# Altium schematic symbol library PCB4_SchLib.SchLib: 20 symbols
Pins are listed as number, name and electrical type; pins without a type are passive.

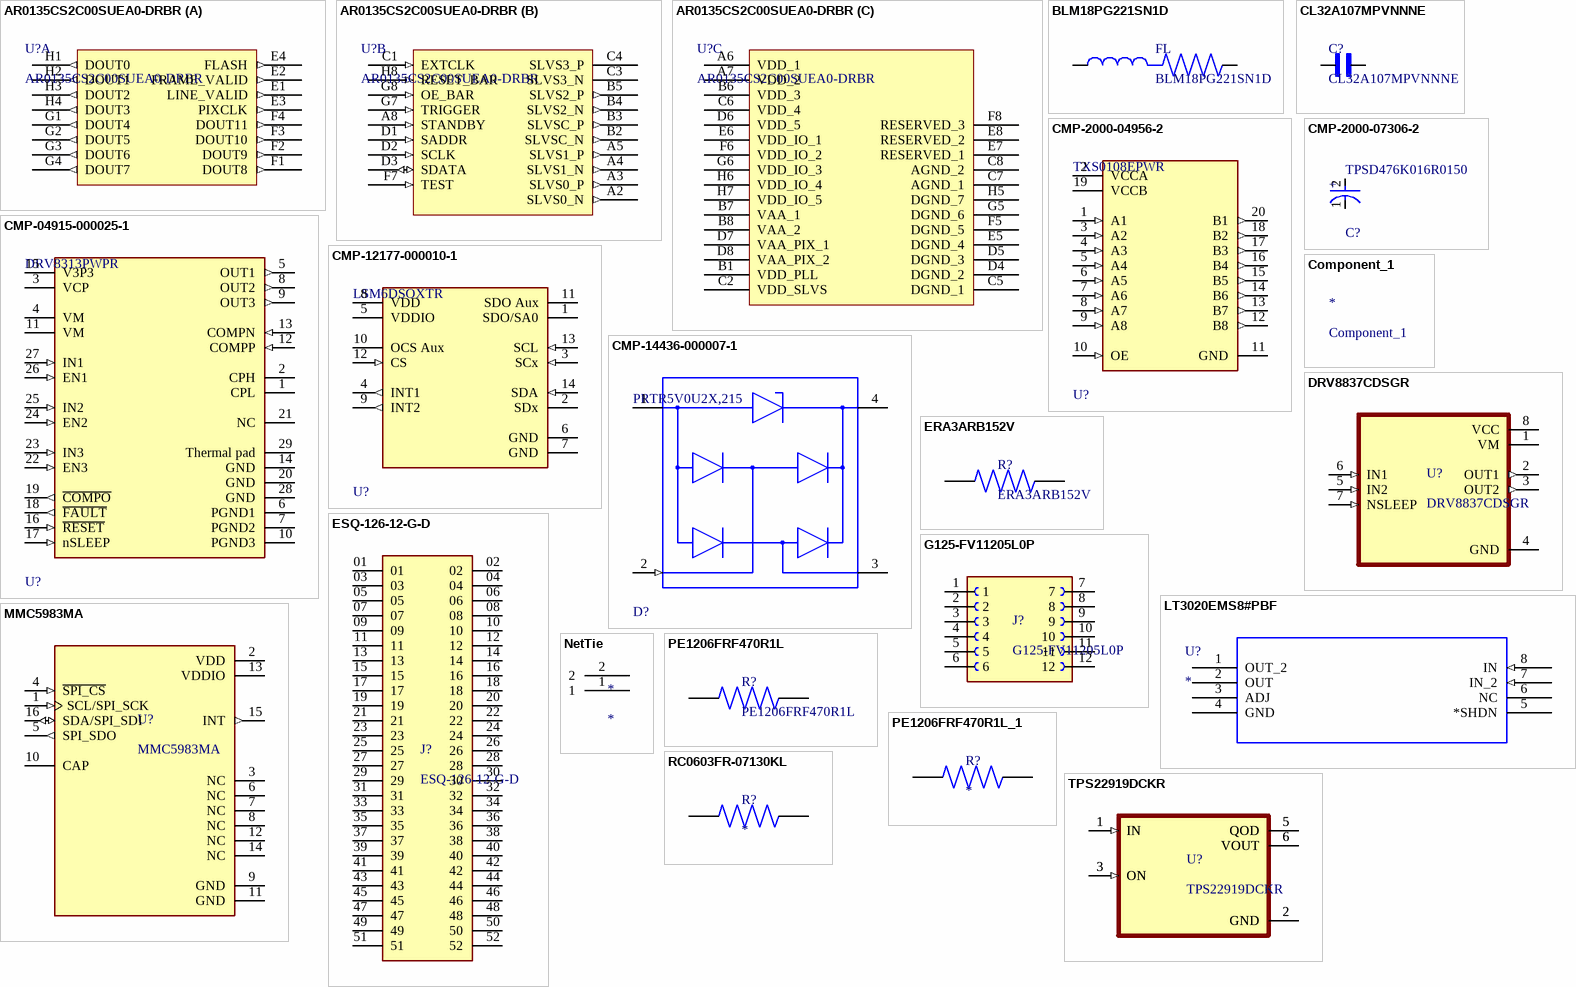
[diagram p0: symbols AR0135CS2C00SUEA0-DRBR to TPS22919DCKR]

## AR0135CS2C00SUEA0-DRBR
designator U?
Manufacturer: ON Semiconductor; Manufacturer Part Number: AR0135CS2C00SUEA0-DRBR; Value: AR0135CS
footprint BGA63C100P8X8_900X900X144N
part A pins: E1 LINE_VALID (out), E2 FRAME_VALID (out), E3 PIXCLK (out), E4 FLASH (out), F1 DOUT8 (out), F2 DOUT9 (out), F3 DOUT10 (out), F4 DOUT11 (out), G1 DOUT4 (out), G2 DOUT5 (out), G3 DOUT6 (out), G4 DOUT7 (out), H1 DOUT0 (out), H2 DOUT1 (out), H3 DOUT2 (out), H4 DOUT3 (out)
part B pins: A2 SLVS0_N (out), A3 SLVS0_P (out), A4 SLVS1_N (out), A5 SLVS1_P (out), A8 STANDBY (in), B2 SLVSC_N (out), B3 SLVSC_P (out), B4 SLVS2_N (out), B5 SLVS2_P (out), C1 EXTCLK (in), C3 SLVS3_N, C4 SLVS3_P, D1 SADDR (in), D2 SCLK (in), D3 SDATA (io), F7 TEST (in), G7 TRIGGER (in), G8 OE_BAR (in), H8 RESET_BAR (in)
part C pins: A6 VDD_1 (power), A7 VDD_2 (power), B1 VDD_PLL (power), B6 VDD_3 (power), B7 VAA_1 (power), B8 VAA_2 (power), C2 VDD_SLVS (power), C5 DGND_1 (power), C6 VDD_4 (power), C7 AGND_1 (power), C8 AGND_2 (power), D4 DGND_2 (power), D5 DGND_3 (power), D6 VDD_5 (power), D7 VAA_PIX_1 (power), D8 VAA_PIX_2 (power), E5 DGND_4 (power), E6 VDD_IO_1 (power), E7 RESERVED_1, E8 RESERVED_2, F5 DGND_5 (power), F6 VDD_IO_2 (power), F8 RESERVED_3, G5 DGND_6 (power), G6 VDD_IO_3 (power), H5 DGND_7 (power), H6 VDD_IO_4 (power), H7 VDD_IO_5 (power)

## BLM18PG221SN1D
designator FL
MF: Murata; MP: BLM18PG221SN1D; Value: *; Availability: Unavailable; SnapEDA_Link: https://www.snapeda.com/parts/BLM18PG221SN1D/Murata/view-part/236838/?ref=snap; Price: None; Package: 1608 Murata
footprint BEADC1608X95N
pins: 1, 1, 2, 2

## CL32A107MPVNNNE
designator C?
CL32 Series 100 uF 10 V Â±20 % Tolerance X5R SMT Multilayer Ceramic Capacitor; MF: Samsung Electro-Mechanics; SnapEDA_Link: https://www.snapeda.com/parts/CL32A107MPVNNNE/Samsung/view-part/?ref=snap; Package: SMD-2 Samsung; Value: *; MP: CL32A107MPVNNNE; Check_prices: https://www.snapeda.com/parts/CL32A107MPVNNNE/Samsung/view-part/?ref=eda
footprint CAPC3225X280N
pins: 1, 2

## CMP-2000-04956-2
designator U?, comment TXS0108EPWR
IC TRNSLTR BIDIRECTIONAL 20TSSOP; Number of Inputs: 8; Supply Current: 8uA; Low Level Output Current: 50mA; Min Supply Voltage: 1.2V; Quiescent Current: 3uA; Output Type: Voltage; Propagation Delay: 4.8ns; Max Supply Voltage: 5.5V; Output Current: 620uA; Turn-On Delay Time: 312ns; Logic Function: Translator; Data Rate: 60Mbps; Rise Time: 6.3ns; High Level Output Current: -50mA; Number of Pins: 20; Packaging: Tape and Reel; Max Operating Temperature: 85°C; Height: 1.15mm; Nominal Supply Current: 8uA; Termination: SMD/SMT; Lead Free: Lead Free; Package Quantity: 1; Number of Bits: 8; Weight: 0.002716oz; Contact Plating: Gold; Series: -; Width: 4.4mm; Radiation Hardening: No; Mount: Surface Mount; Length: 6.5mm; Case/Package: TSSOP; REACH SVHC: No SVHC; RoHS Compliant: Yes; Min Operating Temperature: -40°C; Number of Channels: 8
footprint FP-PW0020A-IPC_C
footprint FP-PW0020A-MFG
footprint FP-PW0020A-IPC_B
footprint FP-PW0020A-IPC_A
pins: 1 A1 (in), 2 VCCA (power), 3 A2 (in), 4 A3 (in), 5 A4 (in), 6 A5 (in), 7 A6 (in), 8 A7 (in), 9 A8 (in), 10 OE (in), 11 GND (power), 12 B8 (out), 13 B7 (out), 14 B6 (out), 15 B5 (out), 16 B4 (out), 17 B3 (out), 18 B2 (out), 19 VCCB (power), 20 B1 (out)

## CMP-2000-07306-2
designator C?, comment TPSD476K016R0150
CAP TANT 47UF 10% 16V 2917; Leakage Current: 7.5uA; Dielectric Material: Tantalum; Ripple Current: 400uA; Approvals: IEC; Polarity: Polar; Dissipation Factor: 6%; ESR (Equivalent Series Resistance): 150mR; Lead Free: Lead Free; Capacitance: 47uF; Height: 2.9mm; Case Code (Imperial): 2917; RoHS Compliant: Yes; Voltage Rating: 16V; Min Operating Temperature: -55°C; REACH SVHC: No SVHC; Max Operating Temperature: 125°C; Construction: Flat; Series: TPS; Packaging: Tape and Reel; Number of Pins: 2; Features: General Purpose; Case Code (Metric): 7343; Package Quantity: 1; Mount: Surface Mount; Case/Package: 7343-31; Voltage Rating (DC): 16V; Length: 7.3mm; Radiation Hardening: No; Voltage: 16V; Height - Seated (Max): 0.122inch; Termination: SMD/SMT; Depth: 4.3mm; Width: 0.169inch; Tolerance: 10%
footprint FP-TPSD-MFG
pins: 1 C, 2 A
text: +

## CMP-04915-000025-1
designator U?, comment DRV8313PWPR
IC MOTOR DRIVER 8V-60V 28HTSSOP; Min Supply Voltage: 8V; Max Supply Voltage: 60V; Interface: Parallel; Output Current: 1.75A; Number of Outputs: 1; Logic Function: AND GATE; Package Quantity: 2000; Number of Pins: 28; Case/Package: HTSSOP; Min Operating Temperature: -40°C; Mount: Surface Mount; Series: -; Packaging: Tape and Reel; Max Operating Temperature: 125°C; Lead Free: Lead Free
footprint FP-PWP0028C-MFG
footprint FP-PWP0028C-IPC_B
footprint FP-PWP0028C-IPC_A
footprint FP-PWP0028C-IPC_C
pins: 1 CPL (power), 2 CPH (power), 3 VCP (power), 4 VM (power), 5 OUT1 (out), 6 PGND1 (power), 7 PGND2 (power), 8 OUT2 (out), 9 OUT3 (out), 10 PGND3 (power), 11 VM (power), 12 COMPP (in), 13 COMPN (in), 14 GND (power), 15 V3P3 (power), 16 ~{RESET} (in), 17 nSLEEP (in), 18 ~{FAULT} (out), 19 ~{COMPO} (out), 20 GND (power), 21 NC, 22 EN3 (in), 23 IN3 (in), 24 EN2 (in), 25 IN2 (in), 26 EN1 (in), 27 IN1 (in), 28 GND (power), 29 Thermal pad (power)

## CMP-12177-000010-1
designator U?, comment LSM6DSOXTR
INEMO INERTIAL MODULE: 3D ACCELE; Manufacturer: STMicroelectronics; Sensor Type: Temperature,Accelerometer,Gyroscope; Accel Range: 2/4/8/16g; Accel Sensitivity: 0.061/0.122/0.244/0.488mV/g; Operating Supply Current: 0.55mA; Gyro Range: 125/250/500/1000/2000°/s; Gyro Sensitivity: 4.375/8.75/17.5/35/70LSB/°/s; Sensor Output: I2C,SPI,Other; Min Supply Voltage: 1.62V; Max Supply Voltage: 3.6V; Octopart: https://octopart.com/lsm6dsoxtr-stmicroelectronics-98102600; Package: LGA-14L-DM00249496; Footprint Url: https://www.st.com/content/ccc/resource/technical/document/technical_note/73/17/9c/16/dd/96/4a/01/CD00134799.pdf/files/CD00134799.pdf/jcr:content/translations/en.CD00134799.pdf; ComponentLink2Description: Datasheet; Mouser Description: LSM6DSOX: 3.6 V 3 Axis Accelerometer Gyroscope iNEMO Inertial Module - LGA-14L; ComponentLink2URL: https://www.st.com/resource/en/datasheet/lsm6dsox.pdf; Temperature Range Low: -40°C; Digikey Description: INEMO INERTIAL MODULE: 3D ACCELE; Lead Free: Yes; Device Class L3: Inertial Measurement Units (IMUs); Category: IC; Device Class L2: Motion Sensors; RoHS: TRUE; Temperature: -40°C to +85°C; Height: 0.86mm; Device Class L1: Sensors; Temperature Range High: +85°C; Manufacturer Part Number: LSM6DSOXTR; Automotive: No
footprint FP-LGA-14L-DM00249496-MFG
pins: 1 SDO/SA0, 2 SDx, 3 SCx (in), 4 INT1 (out), 5 VDDIO (power), 6 GND (power), 7 GND (power), 8 VDD (power), 9 INT2 (out), 10 OCS Aux, 11 SDO Aux, 12 CS (in), 13 SCL (in), 14 SDA (in)

## CMP-14436-000007-1
designator D?, comment PRTR5V0U2X,215
TVS DIODE 5.5V SOT143B; Manufacturer: Nexperia; Manufacturer Part Number: PRTR5V0U2X,215
footprint FP-SOT143B-MFG
pins: 1 GND (power), 2 I/O 1 (in), 3 I/O 2, 4 VCC (power)

## Component_1
designator *

## DRV8837CDSGR
designator U?
12-V, 1-A H-bridge motor driver; MF: Texas Instruments; SnapEDA_Link: https://www.snapeda.com/parts/DRV8837CDSGR/Texas+Instruments/view-part/?ref=snap; Package: WSON-8 Texas Instruments; Value: *; MP: DRV8837CDSGR; Check_prices: https://www.snapeda.com/parts/DRV8837CDSGR/Texas+Instruments/view-part/?ref=eda; Manufacturer: Texas Instruments; Manufacturer Part Number: DRV8837CDSGR; Reference: DRV8837C
footprint SON50P200X200X80-9N
pins: 1 VM (power), 2 OUT1 (out), 3 OUT2 (out), 4 GND (power), 5 IN2 (in), 6 IN1 (in), 7 NSLEEP (in), 8 VCC (power)

## ERA3ARB152V
designator R?
RES SMD 1.5K OHM 0.1% 1/10W 0603; MF: Panasonic; MP: ERA-3ARB152V; Package: 1608-2 Panasonic; Price: None; Check_prices: https://www.snapeda.com/parts/ERA-3ARB152V/Panasonic/view-part/?ref=eda; Value: *; SnapEDA_Link: https://www.snapeda.com/parts/ERA-3ARB152V/Panasonic/view-part/?ref=snap; Availability: In Stock; Purchase-URL: https://pricing.snapeda.com/search?q=ERA-3ARB152V&ref=eda
footprint RES_ERA3ARB152V
pins: 1, 2

## ESQ-126-12-G-D
designator J?
Availability: Unavailable; Package: None; Price: None; MP: ESQ-126-12-G-D; Value: *
footprint SAMTEC_ESQ-126-12-G-D
pins: 01, 02, 03, 04, 05, 06, 07, 08, 09, 10, 11, 12, 13, 14, 15, 16, 17, 18, 19, 20, 21, 22, 23, 24, 25, 26, 27, 28, 29, 30, 31, 32, 33, 34, 35, 36, 37, 38, 39, 40, 41, 42, 43, 44, 45, 46, 47, 48, 49, 50, 51, 52

## G125-FV11205L0P
designator J?
Package: None; Price: None; Value: *; MP: G125-FV11205L0P; Availability: Unavailable
footprint HARWIN_G125-FV11205L0P
pins: 1, 2, 3, 4, 5, 6, 7, 8, 9, 10, 11, 12

## LT3020EMS8#PBF
designator U?
MF: {'manufacturer': u'Analog Devices Inc.'}; MP: LT3020EMS8#PBF; Package: None; Price: None; Value: *; Availability: Unavailable
footprint MSOP-8_MS
pins: 1 OUT_2 (power), 2 OUT (power), 3 ADJ, 4 GND (power), 5 *SHDN, 6 NC, 7 IN_2 (in), 8 IN (in)

## MMC5983MA
designator U?
MMC5983 series Magnetic, Magnetometer Sensor Evaluation Board; Manufacturer: MEMSIC; MF: Memsic Inc.; Purchase-URL: https://pricing.snapeda.com/search/part/MMC5983MA/?ref=eda; Price: None; Check_prices: https://www.snapeda.com/parts/MMC5983MA/Memsic+Inc./view-part/?ref=eda; SnapEDA_Link: https://www.snapeda.com/parts/MMC5983MA/Memsic+Inc./view-part/?ref=snap; Package: VFLGA-16 Memsic Inc.; Availability: In Stock; MP: MMC5983MA; Value: *; Manufacturer Part Number: MMC5983MA; Reference: MMC5983MA
footprint PQFN50P300X300X100-16N
footprint PQFN50P300X300X100-16N
pins: 1 SCL/SPI_SCK (in), 2 VDD (power), 3 NC, 4 ~{SPI_CS} (in), 5 SPI_SDO (out), 6 NC, 7 NC, 8 NC, 9 GND (power), 10 CAP, 11 GND (power), 12 NC, 13 VDDIO (power), 14 NC, 15 INT (out), 16 SDA/SPI_SDI (io)

## NetTie
designator *  (net tie, no BOM)
footprint NetTie
pins: 1, 2

## PE1206FRF470R1L
designator R?
100 mOhms Â±1% 1W Chip Resistor 1206 (3216 Metric) Automotive AEC-Q200, Current Sense, Moisture Resistant Metal Foil; MF: Yageo; SnapEDA_Link: https://www.snapeda.com/parts/PE1206FRF470R1L/Yageo/view-part/?ref=snap; Package: 3216 Yageo; Value: *; MP: PE1206FRF470R1L; Check_prices: https://www.snapeda.com/parts/PE1206FRF470R1L/Yageo/view-part/?ref=eda
footprint RESC3216X89N
pins: 1, 2

## PE1206FRF470R1L_1
designator R?
100 mOhms Â±1% 1W Chip Resistor 1206 (3216 Metric) Automotive AEC-Q200, Current Sense, Moisture Resistant Metal Foil; MF: Yageo; MP: PE1206FRF470R1L; SnapEDA_Link: https://www.snapeda.com/parts/PE1206FRF470R1L/Yageo/view-part/?ref=snap; Package: 3216 Yageo; Value: *; Check_prices: https://www.snapeda.com/parts/PE1206FRF470R1L/Yageo/view-part/?ref=eda
footprint RESC3216X89N
pins: 1, 2

## RC0603FR-07130KL
designator R?
130 kOhms Â±1% 0.1W, 1/10W Chip Resistor 0603 (1608 Metric) Moisture Resistant Thick Film; MF: Yageo; MP: RC0603FR-07130KL; SnapEDA_Link: https://www.snapeda.com/parts/RC0603FR-07130KL/Yageo/view-part/?ref=snap; Package: 1608 Yageo; Value: *; Check_prices: https://www.snapeda.com/parts/RC0603FR-07130KL/Yageo/view-part/?ref=eda
footprint RESC1608X55N
pins: 1, 2

## TPS22919DCKR
designator U?
5.5-V, 1.5-A, 90-mÎ© load switch with adj. output discharge; MF: Texas Instruments; SnapEDA_Link: https://www.snapeda.com/parts/TPS22919DCKR/Texas+Instruments/view-part/?ref=snap; Package: SOT-SC70-6 Texas Instruments; Value: *; MP: TPS22919DCKR; Check_prices: https://www.snapeda.com/parts/TPS22919DCKR/Texas+Instruments/view-part/?ref=eda
footprint SOT65P210X110-6N
pins: 1 IN (in), 1 IN (in), 2 GND (power), 2 GND (power), 3 ON (in), 3 ON (in), 5 QOD (power), 5 QOD (power), 6 VOUT (power), 6 VOUT (power)